# Altium schematic symbol library OP_AMP.SchLib: 2 symbols
Pins are listed as number, name and electrical type; pins without a type are passive.

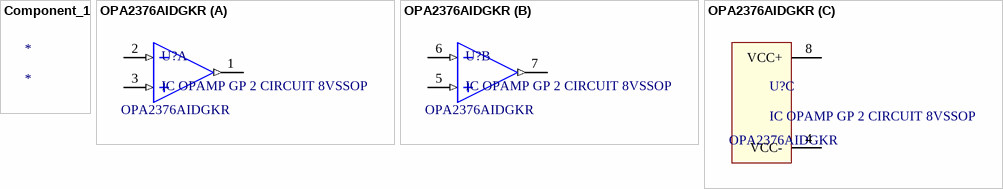
[diagram p0: symbols Component_1 to OPA2376AIDGKR]

## Component_1
designator *

## OPA2376AIDGKR
designator U?, comment IC OPAMP GP 2 CIRCUIT 8VSSOP  Manufacturer Part: OPA2376AIDGKR
Dual, Precision, Low Noise, Low Quiescent Current Operational Amplifier 8-VSSOP -40 to 125; LCSC Part Number: C54292
footprint SOP65P490X110-8N
part A pins: 1 1OUT (out), 2 1IN- (in), 3 1IN+ (in)
part B pins: 5 2IN+ (in), 6 2IN- (in), 7 2OUT (out)
part C pins: 4 VCC- (power), 8 VCC+ (power)